# Altium footprint library WR-TBL_Pluggable Connector_5.08mm.PcbLib: 295 footprints (part 3 of 19)
Each footprint in its own frame and in the unit in brackets; x right, y up, seen from the top. Pads: shape width x height; smd on the part's side, far side on the other; paste and mask are expansions set on the pad; w line width, h text height; cw(c..) or ccw(c..) is an arc to the next point about the centre after c.
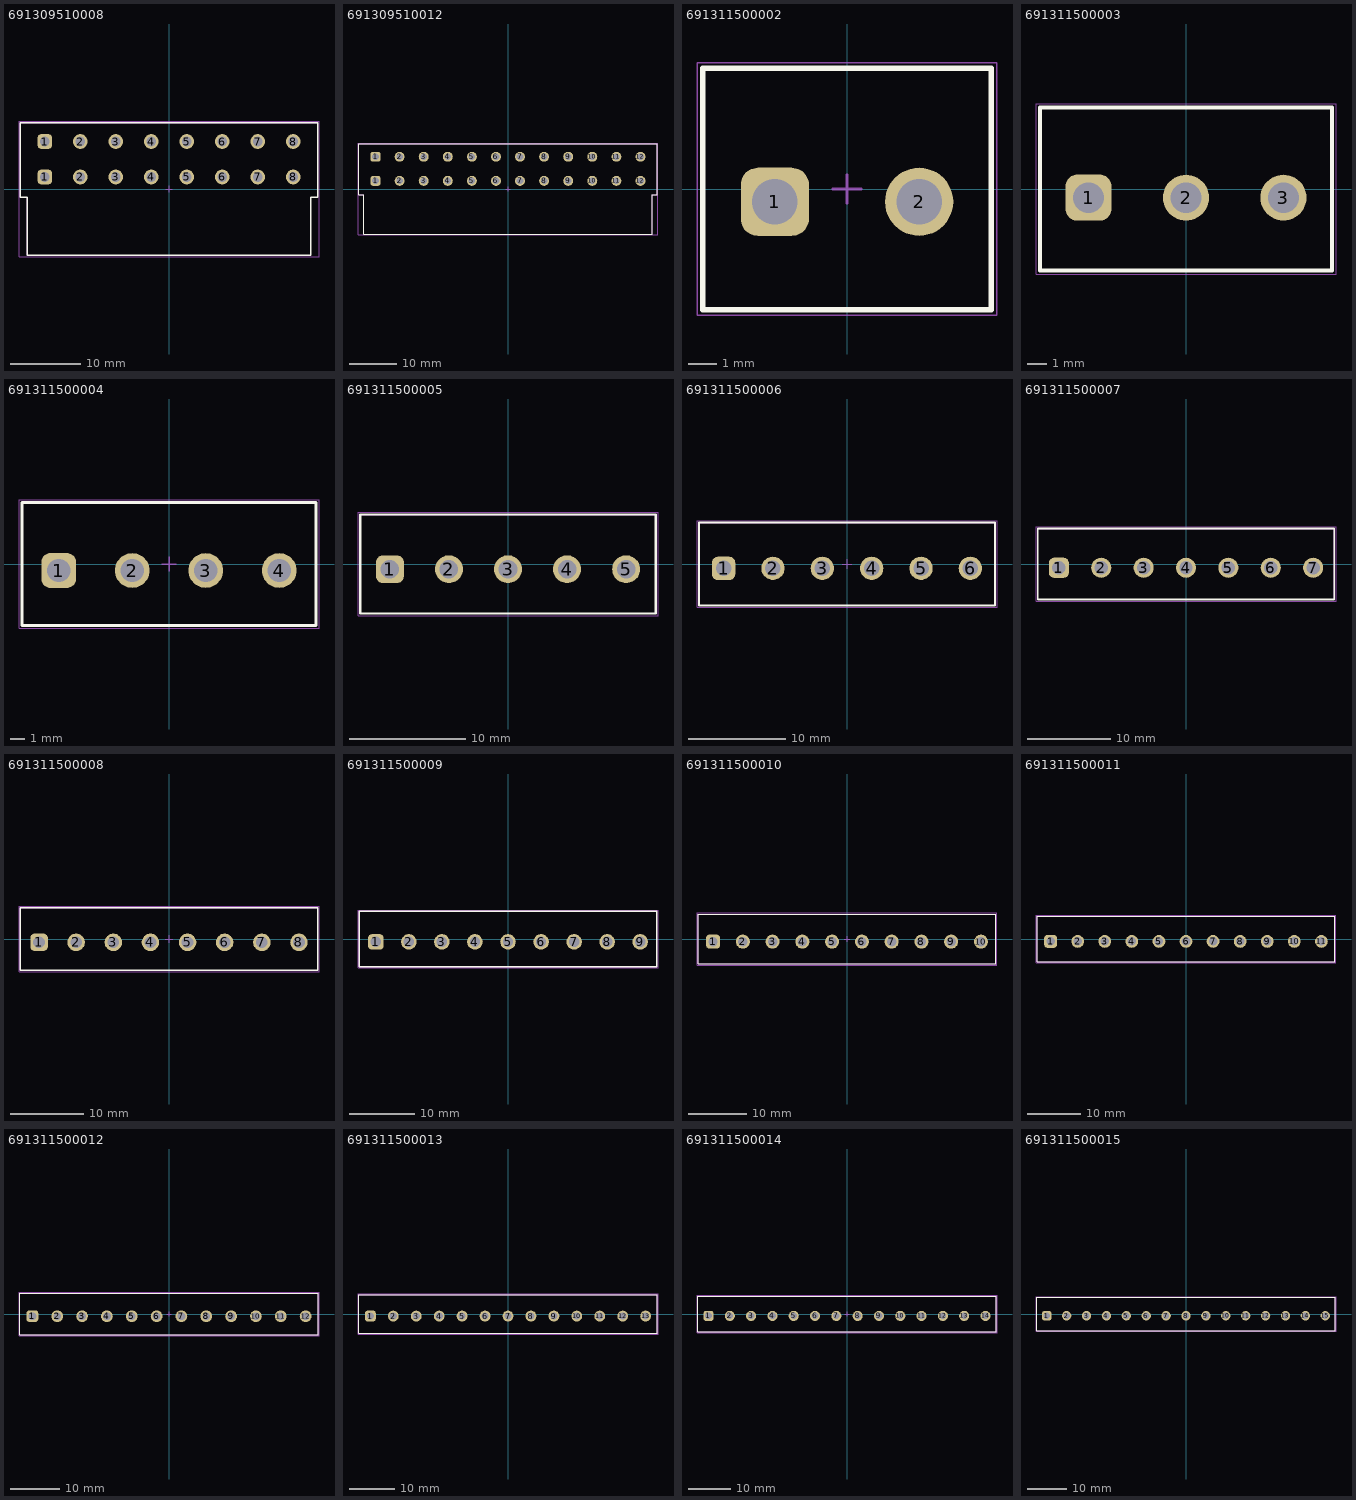
[diagram p2: the footprints below, top view; thin cyan lines are the x and y axes]

## 691309510008 [mm] "5.08 mm Reversed Gender Horizontal PCB Header - 08p"
height 8.6
pads (16):
  rrect50% 2.1x2.1 hole 1.4: 1(-17.78,1.72) 1(-17.78,6.8)
  round 2.1 hole 1.4: 2(-12.7,1.72) 2(-12.7,6.8) 3(-7.62,1.72) 3(-7.62,6.8) 4(-2.54,1.72) 4(-2.54,6.8) 5(2.54,1.72) 5(2.54,6.8) 6(7.62,1.72) 6(7.62,6.8) 7(12.7,1.72) 7(12.7,6.8) 8(17.78,1.72) 8(17.78,6.8)
Top Overlay:
  lines w0.2: -21.28,-1.2 -20.28,-1.2 -20.28,-9.5 20.28,-9.5 20.28,-1.2 21.28,-1.2 21.28,9.5 -21.28,9.5 -21.28,-1.2
Top Assembly:
  lines w0.1: -21.28,-1.2 -21.28,9.5 21.28,9.5 21.28,-1.2 20.28,-1.2 20.28,-9.5 -20.28,-9.5 -20.28,-1.2 -21.28,-1.2
Top Designator:
  text ".Designator" at -3.647,-0.357 h1
Top 3D Body:
  lines w0.1: -21.28,-1.2 -20.28,-1.2 -20.28,-9.5 20.28,-9.5 20.28,-1.2 21.28,-1.2 21.28,9.5 -21.28,9.5 -21.28,-1.2
Top Courtyard:
  lines w0.05: -21.48,-9.7 21.48,-9.7 21.48,9.7 -21.48,9.7 -21.48,-9.7
Top Component Center:
  lines w0.1: -0.5,0 0.5,0 ; 0,-0.5 0,0.5
3D body "691309510008.stp": height 10.94, standoff -3.55, extent -21.28,-9.5 21.28,9.5

## 691309510012 [mm] "5.08 mm Reversed Gender Horizontal PCB Header - 12p"
height 8.6
pads (24):
  rrect50% 2.1x2.1 hole 1.4: 1(-27.94,1.72) 1(-27.94,6.8)
  round 2.1 hole 1.4: 2(-22.86,1.72) 2(-22.86,6.8) 3(-17.78,1.72) 3(-17.78,6.8) 4(-12.7,1.72) 4(-12.7,6.8) 5(-7.62,1.72) 5(-7.62,6.8) 6(-2.54,1.72) 6(-2.54,6.8) 7(2.54,1.72) 7(2.54,6.8) 8(7.62,1.72) 8(7.62,6.8) 9(12.7,1.72) 9(12.7,6.8) 10(17.78,1.72) 10(17.78,6.8) 11(22.86,1.72) 11(22.86,6.8) 12(27.94,1.72) 12(27.94,6.8)
Top Overlay:
  lines w0.2: -31.44,-1.2 -31.44,9.5 31.44,9.5 31.44,-1.2 30.44,-1.2 30.44,-9.5 -30.44,-9.5 -30.44,-1.2 -31.44,-1.2
Top Assembly:
  lines w0.1: -31.44,-1.2 -30.44,-1.2 -30.44,-9.5 30.44,-9.5 30.44,-1.2 31.44,-1.2 31.44,9.5 -31.44,9.5 -31.44,-1.2
Top Designator:
  text ".Designator" at -3.647,-0.357 h1
Top 3D Body:
  lines w0.1: -31.44,-1.2 -31.44,9.5 31.44,9.5 31.44,-1.2 30.44,-1.2 30.44,-9.5 -30.44,-9.5 -30.44,-1.2 -31.44,-1.2
Top Courtyard:
  lines w0.05: -31.64,-9.7 -31.64,9.7 31.64,9.7 31.64,-9.7 -31.64,-9.7
Top Component Center:
  lines w0.1: -0.5,0 0.5,0 ; 0,-0.5 0,0.5
3D body "691309510012.stp": height 10.94, standoff -3.55, extent -31.44,-9.5 31.44,9.5

## 691311500002 [mm] "5,08mm - PCB Headers - Vertical - Opened ends -02p"
height 12
pads (2):
  rrect50% 2.4x2.4 hole 1.6: 1(-2.54,-0.45)
  round 2.4 hole 1.6: 2(2.54,-0.45)
Top Overlay:
  lines w0.2: -5.08,-4.25 -5.08,4.25 5.08,4.25 5.08,-4.25 -5.08,-4.25
Top Assembly:
  lines w0.1: -5.08,-4.25 5.08,-4.25 5.08,4.25 -5.08,4.25 -5.08,-4.25
Top Designator:
  text ".Designator" at -3.647,-0.357 h1
Top 3D Body:
  lines w0.1: -5.08,-4.25 -5.08,4.25 5.08,4.25 5.08,-4.25 -5.08,-4.25
Top Courtyard:
  lines w0.05: -5.28,-4.45 -5.28,4.45 5.28,4.45 5.28,-4.45 -5.28,-4.45
Top Component Center:
  lines w0.1: -0.5,0 0.5,0 ; 0,-0.5 0,0.5
3D body "691311500002.stp": height 12.05, standoff -3.95, extent -5.08,-4.25 5.08,4.25

## 691311500003 [mm] "5,08mm - PCB Headers - Vertical - Opened ends -03p"
height 12
pads (3):
  rrect50% 2.4x2.4 hole 1.6: 1(-5.08,-0.45)
  round 2.4 hole 1.6: 2(0,-0.45) 3(5.08,-0.45)
Top Overlay:
  lines w0.2: -7.62,-4.25 -7.62,4.25 7.62,4.25 7.62,-4.25 -7.62,-4.25
Top Assembly:
  lines w0.1: -7.62,-4.25 7.62,-4.25 7.62,4.25 -7.62,4.25 -7.62,-4.25
Top Designator:
  text ".Designator" at -3.647,-0.357 h1
Top 3D Body:
  lines w0.1: -7.62,-4.25 -7.62,4.25 7.62,4.25 7.62,-4.25 -7.62,-4.25
Top Courtyard:
  lines w0.05: -7.82,-4.45 -7.82,4.45 7.82,4.45 7.82,-4.45 -7.82,-4.45
Top Component Center:
  lines w0.1: -0.5,0 0.5,0 ; 0,-0.5 0,0.5
3D body "691311500003.stp": height 12.05, standoff -3.95, extent -7.62,-4.25 7.62,4.25

## 691311500004 [mm] "5,08mm - PCB Headers - Vertical - Opened ends -04p"
height 12
pads (4):
  rrect50% 2.4x2.4 hole 1.6: 1(-7.62,-0.45)
  round 2.4 hole 1.6: 2(-2.54,-0.45) 3(2.54,-0.45) 4(7.62,-0.45)
Top Overlay:
  lines w0.2: -10.16,-4.25 10.16,-4.25 10.16,4.25 -10.16,4.25 -10.16,-4.25
Top Assembly:
  lines w0.1: -10.16,-4.25 -10.16,4.25 10.16,4.25 10.16,-4.25 -10.16,-4.25
Top Designator:
  text ".Designator" at -3.647,-0.357 h1
Top 3D Body:
  lines w0.1: -10.16,-4.25 10.16,-4.25 10.16,4.25 -10.16,4.25 -10.16,-4.25
Top Courtyard:
  lines w0.05: -10.36,-4.45 10.36,-4.45 10.36,4.45 -10.36,4.45 -10.36,-4.45
Top Component Center:
  lines w0.1: -0.5,0 0.5,0 ; 0,-0.5 0,0.5
3D body "691311500004.stp": height 12.05, standoff -3.95, extent -10.16,-4.25 10.16,4.25

## 691311500005 [mm] "5,08mm - PCB Headers - Vertical - Opened ends -05p"
height 12
pads (5):
  rrect50% 2.4x2.4 hole 1.6: 1(-10.16,-0.45)
  round 2.4 hole 1.6: 2(-5.08,-0.45) 3(0,-0.45) 4(5.08,-0.45) 5(10.16,-0.45)
Top Overlay:
  lines w0.2: -12.7,-4.25 -12.7,4.25 12.7,4.25 12.7,-4.25 -12.7,-4.25
Top Assembly:
  lines w0.1: -12.7,-4.25 12.7,-4.25 12.7,4.25 -12.7,4.25 -12.7,-4.25
Top Designator:
  text ".Designator" at -3.647,-0.357 h1
Top 3D Body:
  lines w0.1: -12.7,-4.25 -12.7,4.25 12.7,4.25 12.7,-4.25 -12.7,-4.25
Top Courtyard:
  lines w0.05: -12.9,-4.45 -12.9,4.45 12.9,4.45 12.9,-4.45 -12.9,-4.45
Top Component Center:
  lines w0.1: -0.5,0 0.5,0 ; 0,-0.5 0,0.5
3D body "691311500005.stp": height 12.05, standoff -3.95, extent -12.7,-4.25 12.7,4.25

## 691311500006 [mm] "5,08mm - PCB Headers - Vertical - Opened ends -06p"
height 12
pads (6):
  rrect50% 2.4x2.4 hole 1.6: 1(-12.7,-0.45)
  round 2.4 hole 1.6: 2(-7.62,-0.45) 3(-2.54,-0.45) 4(2.54,-0.45) 5(7.62,-0.45) 6(12.7,-0.45)
Top Overlay:
  lines w0.2: -15.24,-4.25 -15.24,4.25 15.24,4.25 15.24,-4.25 -15.24,-4.25
Top Assembly:
  lines w0.1: -15.24,-4.25 15.24,-4.25 15.24,4.25 -15.24,4.25 -15.24,-4.25
Top Designator:
  text ".Designator" at -3.647,-0.357 h1
Top 3D Body:
  lines w0.1: -15.24,-4.25 -15.24,4.25 15.24,4.25 15.24,-4.25 -15.24,-4.25
Top Courtyard:
  lines w0.05: -15.44,-4.45 -15.44,4.45 15.44,4.45 15.44,-4.45 -15.44,-4.45
Top Component Center:
  lines w0.1: -0.5,0 0.5,0 ; 0,-0.5 0,0.5
3D body "691311500006.stp": height 12.05, standoff -3.95, extent -15.24,-4.25 15.24,4.25

## 691311500007 [mm] "5,08mm - PCB Headers - Vertical - Opened ends -07p"
height 12
pads (7):
  rrect50% 2.4x2.4 hole 1.6: 1(-15.24,-0.45)
  round 2.4 hole 1.6: 2(-10.16,-0.45) 3(-5.08,-0.45) 4(0,-0.45) 5(5.08,-0.45) 6(10.16,-0.45) 7(15.24,-0.45)
Top Overlay:
  lines w0.2: -17.78,-4.25 -17.78,4.25 17.78,4.25 17.78,-4.25 -17.78,-4.25
Top Assembly:
  lines w0.1: -17.78,-4.25 17.78,-4.25 17.78,4.25 -17.78,4.25 -17.78,-4.25
Top Designator:
  text ".Designator" at -3.647,-0.357 h1
Top 3D Body:
  lines w0.1: -17.78,-4.25 -17.78,4.25 17.78,4.25 17.78,-4.25 -17.78,-4.25
Top Courtyard:
  lines w0.05: -17.98,-4.45 -17.98,4.45 17.98,4.45 17.98,-4.45 -17.98,-4.45
Top Component Center:
  lines w0.1: -0.5,0 0.5,0 ; 0,-0.5 0,0.5
3D body "691311500007.stp": height 12.05, standoff -3.95, extent -17.78,-4.25 17.78,4.25

## 691311500008 [mm] "5,08mm - PCB Headers - Vertical - Opened ends -08p"
height 12
pads (8):
  rrect50% 2.4x2.4 hole 1.6: 1(-17.78,-0.45)
  round 2.4 hole 1.6: 2(-12.7,-0.45) 3(-7.62,-0.45) 4(-2.54,-0.45) 5(2.54,-0.45) 6(7.62,-0.45) 7(12.7,-0.45) 8(17.78,-0.45)
Top Overlay:
  lines w0.2: -20.32,-4.25 20.32,-4.25 20.32,4.25 -20.32,4.25 -20.32,-4.25
Top Assembly:
  lines w0.1: -20.32,-4.25 -20.32,4.25 20.32,4.25 20.32,-4.25 -20.32,-4.25
Top Designator:
  text ".Designator" at -3.647,-0.357 h1
Top 3D Body:
  lines w0.1: -20.32,-4.25 20.32,-4.25 20.32,4.25 -20.32,4.25 -20.32,-4.25
Top Courtyard:
  lines w0.05: -20.52,-4.45 20.52,-4.45 20.52,4.45 -20.52,4.45 -20.52,-4.45
Top Component Center:
  lines w0.1: -0.5,0 0.5,0 ; 0,-0.5 0,0.5
3D body "691311500008.stp": height 12.05, standoff -3.95, extent -20.32,-4.25 20.32,4.25

## 691311500009 [mm] "5,08mm - PCB Headers - Vertical - Opened ends -09p"
height 12
pads (9):
  rrect50% 2.4x2.4 hole 1.6: 1(-20.32,-0.45)
  round 2.4 hole 1.6: 2(-15.24,-0.45) 3(-10.16,-0.45) 4(-5.08,-0.45) 5(0,-0.45) 6(5.08,-0.45) 7(10.16,-0.45) 8(15.24,-0.45) 9(20.32,-0.45)
Top Overlay:
  lines w0.2: -22.86,-4.25 22.86,-4.25 22.86,4.25 -22.86,4.25 -22.86,-4.25
Top Assembly:
  lines w0.1: -22.86,-4.25 -22.86,4.25 22.86,4.25 22.86,-4.25 -22.86,-4.25
Top Designator:
  text ".Designator" at -3.647,-0.357 h1
Top 3D Body:
  lines w0.1: -22.86,-4.25 22.86,-4.25 22.86,4.25 -22.86,4.25 -22.86,-4.25
Top Courtyard:
  lines w0.05: -23.06,-4.45 23.06,-4.45 23.06,4.45 -23.06,4.45 -23.06,-4.45
Top Component Center:
  lines w0.1: -0.5,0 0.5,0 ; 0,-0.5 0,0.5
3D body "691311500009.stp": height 12.05, standoff -3.95, extent -22.86,-4.25 22.86,4.25

## 691311500010 [mm] "5,08mm - PCB Headers - Vertical - Opened ends -10p"
height 12
pads (10):
  rrect50% 2.4x2.4 hole 1.6: 1(-22.86,-0.45)
  round 2.4 hole 1.6: 2(-17.78,-0.45) 3(-12.7,-0.45) 4(-7.62,-0.45) 5(-2.54,-0.45) 6(2.54,-0.45) 7(7.62,-0.45) 8(12.7,-0.45) 9(17.78,-0.45) 10(22.86,-0.45)
Top Overlay:
  lines w0.2: -25.4,-4.25 -25.4,4.25 25.4,4.25 25.4,-4.25 -25.4,-4.25
Top Assembly:
  lines w0.1: -25.4,-4.25 25.4,-4.25 25.4,4.25 -25.4,4.25 -25.4,-4.25
Top Designator:
  text ".Designator" at -3.647,-0.357 h1
Top 3D Body:
  lines w0.1: -25.4,-4.25 -25.4,4.25 25.4,4.25 25.4,-4.25 -25.4,-4.25
Top Courtyard:
  lines w0.05: -25.6,-4.45 -25.6,4.45 25.6,4.45 25.6,-4.45 -25.6,-4.45
Top Component Center:
  lines w0.1: -0.5,0 0.5,0 ; 0,-0.5 0,0.5
3D body "691311500010.stp": height 12.05, standoff -3.95, extent -25.4,-4.25 25.4,4.25

## 691311500011 [mm] "5,08mm - PCB Headers - Vertical - Opened ends -11p"
height 12
pads (11):
  rrect50% 2.4x2.4 hole 1.6: 1(-25.4,-0.45)
  round 2.4 hole 1.6: 2(-20.32,-0.45) 3(-15.24,-0.45) 4(-10.16,-0.45) 5(-5.08,-0.45) 6(0,-0.45) 7(5.08,-0.45) 8(10.16,-0.45) 9(15.24,-0.45) 10(20.32,-0.45) 11(25.4,-0.45)
Top Overlay:
  lines w0.2: -27.94,-4.25 -27.94,4.25 27.94,4.25 27.94,-4.25 -27.94,-4.25
Top Assembly:
  lines w0.1: -27.94,-4.25 27.94,-4.25 27.94,4.25 -27.94,4.25 -27.94,-4.25
Top Designator:
  text ".Designator" at -3.647,-0.357 h1
Top 3D Body:
  lines w0.1: -27.94,-4.25 -27.94,4.25 27.94,4.25 27.94,-4.25 -27.94,-4.25
Top Courtyard:
  lines w0.05: -28.14,-4.45 -28.14,4.45 28.14,4.45 28.14,-4.45 -28.14,-4.45
Top Component Center:
  lines w0.1: -0.5,0 0.5,0 ; 0,-0.5 0,0.5
3D body "691311500011.stp": height 12.05, standoff -3.95, extent -27.94,-4.25 27.94,4.25

## 691311500012 [mm] "5,08mm - PCB Headers - Vertical - Opened ends -12p"
height 12
pads (12):
  rrect50% 2.4x2.4 hole 1.6: 1(-27.94,-0.45)
  round 2.4 hole 1.6: 2(-22.86,-0.45) 3(-17.78,-0.45) 4(-12.7,-0.45) 5(-7.62,-0.45) 6(-2.54,-0.45) 7(2.54,-0.45) 8(7.62,-0.45) 9(12.7,-0.45) 10(17.78,-0.45) 11(22.86,-0.45) 12(27.94,-0.45)
Top Overlay:
  lines w0.2: -30.48,-4.25 -30.48,4.25 30.48,4.25 30.48,-4.25 -30.48,-4.25
Top Assembly:
  lines w0.1: -30.48,-4.25 30.48,-4.25 30.48,4.25 -30.48,4.25 -30.48,-4.25
Top Designator:
  text ".Designator" at -3.647,-0.357 h1
Top 3D Body:
  lines w0.1: -30.48,-4.25 -30.48,4.25 30.48,4.25 30.48,-4.25 -30.48,-4.25
Top Courtyard:
  lines w0.05: -30.68,-4.45 -30.68,4.45 30.68,4.45 30.68,-4.45 -30.68,-4.45
Top Component Center:
  lines w0.1: -0.5,0 0.5,0 ; 0,-0.5 0,0.5
3D body "691311500012.stp": height 12.05, standoff -3.95, extent -30.48,-4.25 30.48,4.25

## 691311500013 [mm] "5,08mm - PCB Headers - Vertical - Opened ends -13p"
height 12
pads (13):
  rrect50% 2.4x2.4 hole 1.6: 1(-30.48,-0.45)
  round 2.4 hole 1.6: 2(-25.4,-0.45) 3(-20.32,-0.45) 4(-15.24,-0.45) 5(-10.16,-0.45) 6(-5.08,-0.45) 7(0,-0.45) 8(5.08,-0.45) 9(10.16,-0.45) 10(15.24,-0.45) 11(20.32,-0.45) 12(25.4,-0.45) 13(30.48,-0.45)
Top Overlay:
  lines w0.2: -33.02,-4.25 -33.02,4.25 33.02,4.25 33.02,-4.25 -33.02,-4.25
Top Assembly:
  lines w0.1: -33.02,-4.25 33.02,-4.25 33.02,4.25 -33.02,4.25 -33.02,-4.25
Top Designator:
  text ".Designator" at -3.647,-0.357 h1
Top 3D Body:
  lines w0.1: -33.02,-4.25 -33.02,4.25 33.02,4.25 33.02,-4.25 -33.02,-4.25
Top Courtyard:
  lines w0.05: -33.22,-4.45 -33.22,4.45 33.22,4.45 33.22,-4.45 -33.22,-4.45
Top Component Center:
  lines w0.1: -0.5,0 0.5,0 ; 0,-0.5 0,0.5
3D body "691311500013.stp": height 12.05, standoff -3.95, extent -33.02,-4.25 33.02,4.25

## 691311500014 [mm] "5,08mm - PCB Headers - Vertical - Opened ends -14p"
height 12
pads (14):
  rrect50% 2.4x2.4 hole 1.6: 1(-33.02,-0.45)
  round 2.4 hole 1.6: 2(-27.94,-0.45) 3(-22.86,-0.45) 4(-17.78,-0.45) 5(-12.7,-0.45) 6(-7.62,-0.45) 7(-2.54,-0.45) 8(2.54,-0.45) 9(7.62,-0.45) 10(12.7,-0.45) 11(17.78,-0.45) 12(22.86,-0.45) 13(27.94,-0.45) 14(33.02,-0.45)
Top Overlay:
  lines w0.2: -35.56,-4.25 -35.56,4.25 35.56,4.25 35.56,-4.25 -35.56,-4.25
Top Assembly:
  lines w0.1: -35.56,-4.25 35.56,-4.25 35.56,4.25 -35.56,4.25 -35.56,-4.25
Top Designator:
  text ".Designator" at -3.647,-0.357 h1
Top 3D Body:
  lines w0.1: -35.56,-4.25 -35.56,4.25 35.56,4.25 35.56,-4.25 -35.56,-4.25
Top Courtyard:
  lines w0.05: -35.76,-4.45 -35.76,4.45 35.76,4.45 35.76,-4.45 -35.76,-4.45
Top Component Center:
  lines w0.1: -0.5,0 0.5,0 ; 0,-0.5 0,0.5
3D body "691311500014.stp": height 12.05, standoff -3.95, extent -35.56,-4.25 35.56,4.25

## 691311500015 [mm] "5,08mm - PCB Headers - Vertical - Opened ends -15p"
height 12
pads (15):
  rrect50% 2.4x2.4 hole 1.6: 1(-35.56,-0.45)
  round 2.4 hole 1.6: 2(-30.48,-0.45) 3(-25.4,-0.45) 4(-20.32,-0.45) 5(-15.24,-0.45) 6(-10.16,-0.45) 7(-5.08,-0.45) 8(0,-0.45) 9(5.08,-0.45) 10(10.16,-0.45) 11(15.24,-0.45) 12(20.32,-0.45) 13(25.4,-0.45) 14(30.48,-0.45) 15(35.56,-0.45)
Top Overlay:
  lines w0.2: -38.1,-4.25 38.1,-4.25 38.1,4.25 -38.1,4.25 -38.1,-4.25
Top Assembly:
  lines w0.1: -38.1,-4.25 -38.1,4.25 38.1,4.25 38.1,-4.25 -38.1,-4.25
Top Designator:
  text ".Designator" at -3.647,-0.357 h1
Top 3D Body:
  lines w0.1: -38.1,-4.25 38.1,-4.25 38.1,4.25 -38.1,4.25 -38.1,-4.25
Top Courtyard:
  lines w0.05: -38.3,-4.45 38.3,-4.45 38.3,4.45 -38.3,4.45 -38.3,-4.45
Top Component Center:
  lines w0.1: -0.5,0 0.5,0 ; 0,-0.5 0,0.5
3D body "691311500015.stp": height 12.05, standoff -3.95, extent -38.1,-4.25 38.1,4.25